# Altium footprint library 5.40-SSD1306.PcbLib: 2 footprints
Each footprint in its own frame and in the unit in brackets; x right, y up, seen from the top. Pads: shape width x height; smd on the part's side, far side on the other; paste and mask are expansions set on the pad; w line width, h text height; cw(c..) or ccw(c..) is an arc to the next point about the centre after c.
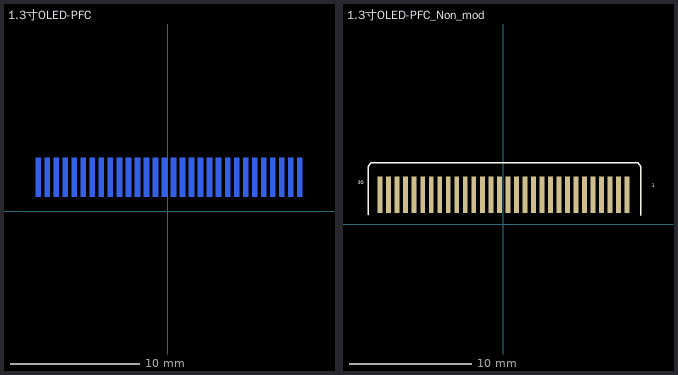
[diagram p0: the footprints below, top view; thin cyan lines are the x and y axes]

## 1.3寸OLED-PFC [mm] "用于OLED的30针脚"
pads (30):
  rect 0.4x3 smd far side: 1(-10.052,2.654) 2(-9.352,2.654) 3(-8.652,2.654) 4(-7.952,2.654) 5(-7.252,2.654) 6(-6.552,2.654) 7(-5.852,2.654) 8(-5.152,2.654) 9(-4.452,2.654) 10(-3.752,2.654) 11(-3.052,2.654) 12(-2.352,2.654) 13(-1.652,2.654) 14(-0.952,2.654) 15(-0.252,2.654) 16(0.448,2.654) 17(1.148,2.654) 18(1.848,2.654) 19(2.548,2.654) 20(3.248,2.654) 21(3.948,2.654) 22(4.648,2.654) 23(5.348,2.654) 24(6.048,2.654) 25(6.748,2.654) 26(7.448,2.654) 27(8.148,2.654) 28(8.848,2.654) 29(9.548,2.654) 30(10.248,2.654)
Bottom Overlay:
  lines w0.127: -11.102,-1.566 -11.102,4.754 -10.902,5.054 11.098,5.054 11.298,4.754 11.298,-1.416
  text "1" at -12.052,1.754 h0.52
  text "30" at 13.948,1.454 h0.52
3D body "1.3_oled1.STEP": height 2.44, standoff -0.8, extent -17.402,-4.946 17.598,18.911

## 1.3寸OLED-PFC_Non_mod [mm] "用于OLED的30针脚"
pads (30):
  rect 0.4x3 smd: 1(10.179,2.426) 2(9.479,2.426) 3(8.779,2.426) 4(8.079,2.426) 5(7.379,2.426) 6(6.679,2.426) 7(5.979,2.426) 8(5.279,2.426) 9(4.579,2.426) 10(3.879,2.426) 11(3.179,2.426) 12(2.479,2.426) 13(1.779,2.426) 14(1.079,2.426) 15(0.379,2.426) 16(-0.321,2.426) 17(-1.021,2.426) 18(-1.721,2.426) 19(-2.421,2.426) 20(-3.121,2.426) 21(-3.821,2.426) 22(-4.521,2.426) 23(-5.221,2.426) 24(-5.921,2.426) 25(-6.621,2.426) 26(-7.321,2.426) 27(-8.021,2.426) 28(-8.721,2.426) 29(-9.421,2.426) 30(-10.121,2.426)
Top Overlay:
  lines w0.127: -11.102,0.815 -11.102,4.754 -10.902,5.054 11.098,5.054 11.298,4.754 11.298,0.767
  text "1" at 12.192,2.921 h0.52
  text "30" at -11.938,3.175 h0.52